# Altium footprint library SensWearComponents.PcbLib: 58 footprints (part 1 of 4)
Each footprint in its own frame and in the unit in brackets; x right, y up, seen from the top. Pads: shape width x height; smd on the part's side, far side on the other; paste and mask are expansions set on the pad; w line width, h text height; cw(c..) or ccw(c..) is an arc to the next point about the centre after c.
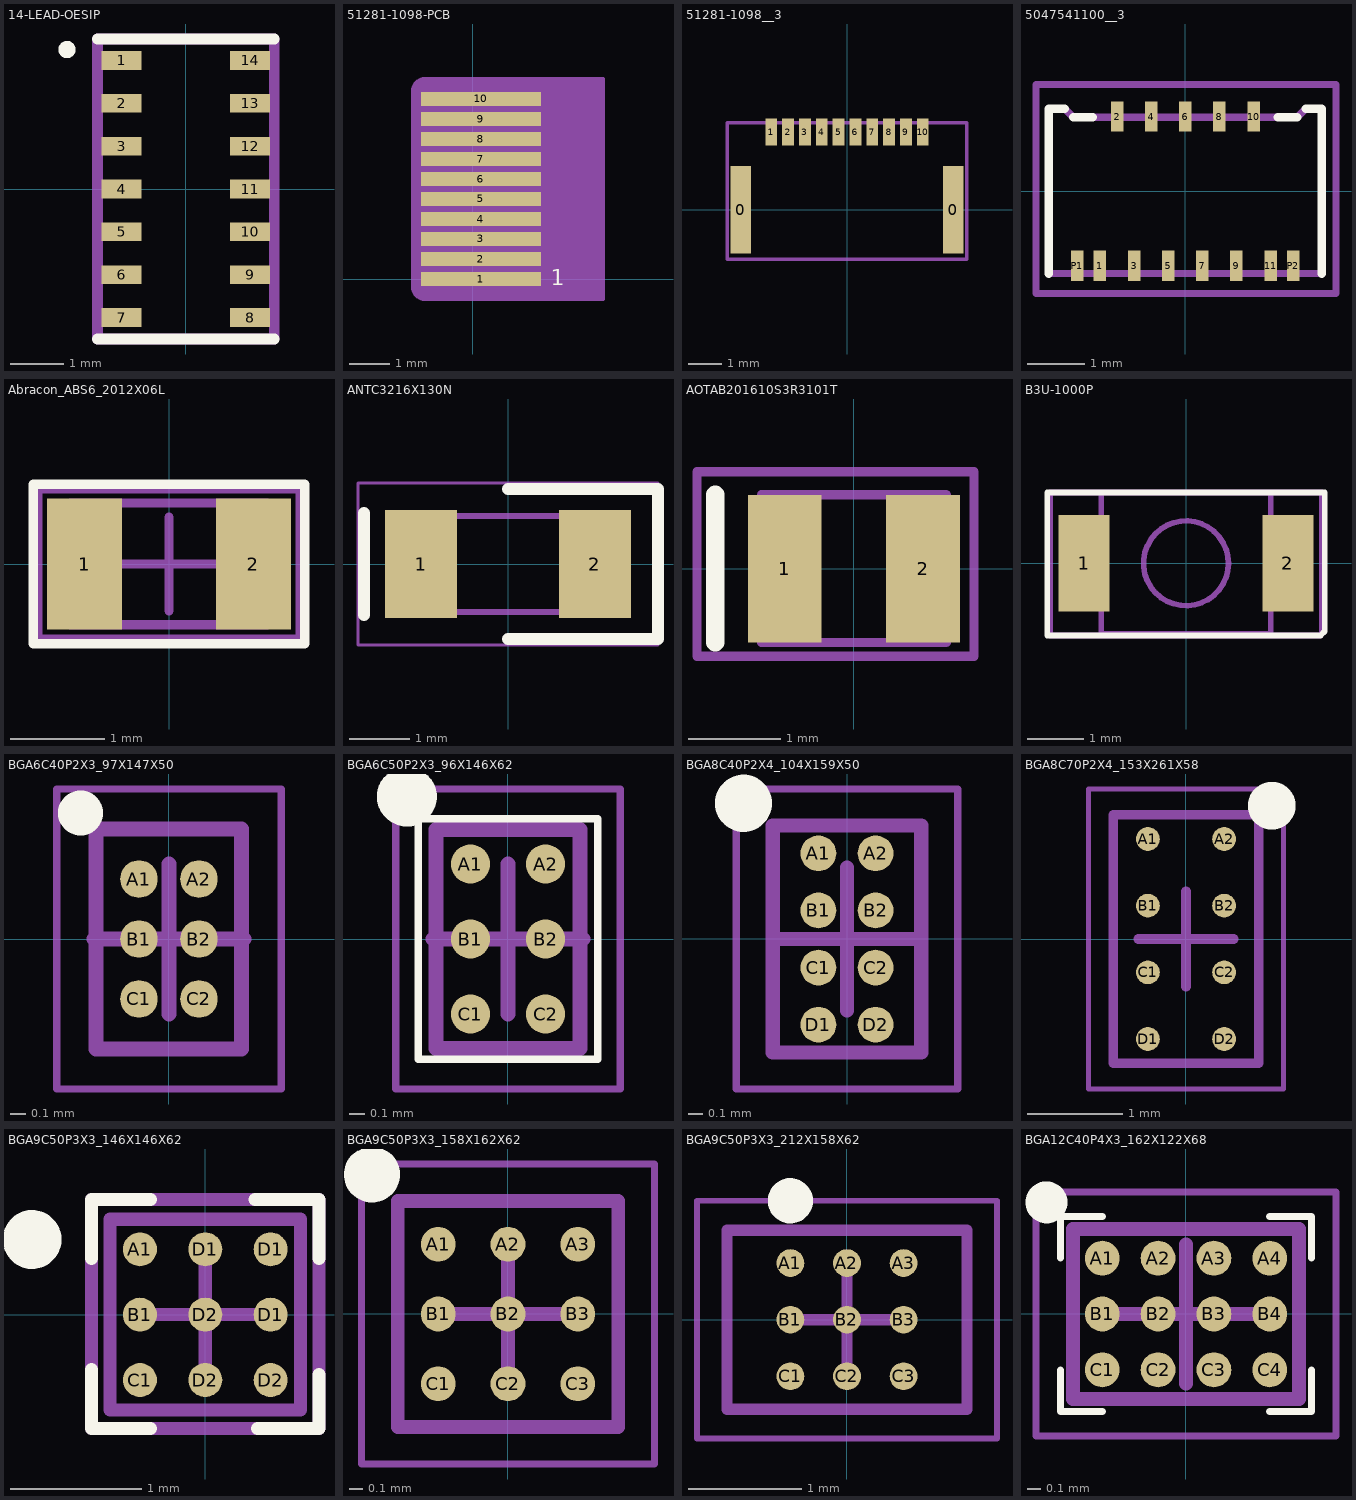
[diagram p0: the footprints below, top view; thin cyan lines are the x and y axes]

## 14-LEAD-OESIP [mm]
pads (14):
  rect 0.75x0.35 smd: 1(-1.2,2.4) 2(-1.2,1.6) 3(-1.2,0.8) 4(-1.2,0) 5(-1.2,-0.8) 6(-1.2,-1.6) 7(-1.2,-2.4) 8(1.2,-2.4) 9(1.2,-1.6) 10(1.2,-0.8) 11(1.2,0) 12(1.2,0.8) 13(1.2,1.6) 14(1.2,2.4)
Top Overlay:
  circle w0.2: c-2.219,2.603 r0.06
  lines w0.2: -1.65,-2.8 1.65,-2.8 ; -1.65,2.8 1.65,2.8
Mechanical 13:
  lines w0.2: -1.65,-2.8 -1.65,2.8 1.65,2.8 1.65,-2.8 -1.65,-2.8
Mechanical 29:
  text ".Designator" at 0.212,-2.198 h1
3D body "MAX30101EFD+T.stp": height 1.33, standoff 0, extent -1.4,-2.8 1.4,2.8

## 51281-1098-PCB [mm]
pads (10):
  rect 3x0.35 smd paste-400 mask+0: 1(0.2,0) 2(0.2,0.5) 3(0.2,1) 4(0.2,1.5) 5(0.2,2) 6(0.2,2.5) 7(0.2,3) 8(0.2,3.5) 9(0.2,4) 10(0.2,4.5)
Top Overlay:
  text "1" at 1.95,-0.15 h0.4
Mechanical 1:
  lines w0.1: 3.25,-0.5 -1.2,-0.5 cw(c-1.2,-0.2) -1.5,-0.2 -1.5,4.7 cw(c-1.2,4.7) -1.2,5 3.25,5
Mechanical 2:
  region: -1.2,-0.5 -1.26,-0.5 -1.37,-0.454 -1.454,-0.37 -1.5,-0.26 -1.5,-0.2 -1.5,4.7 -1.5,4.76 -1.454,4.87 -1.37,4.954 -1.26,5 -1.2,5 3.25,5 3.25,-0.5
  lines w0.1: -1.5,-0.2 ccw(c-1.2,-0.2) -1.2,-0.5 3.25,-0.5 3.25,5 -1.2,5 ccw(c-1.2,4.7) -1.5,4.7 -1.5,-0.2
  text "Stiffner" at -0.75,-1.5 h0.4

## 51281-1098__3 [mm]
pads (12):
  rect 0.6x2.6 smd: 0(-3.15,0) 0(3.15,0)
  rect 0.35x0.8 smd: 1(-2.25,2.3) 2(-1.75,2.3) 3(-1.25,2.3) 4(-0.75,2.3) 5(-0.25,2.3) 6(0.25,2.3) 7(0.75,2.3) 8(1.25,2.3) 9(1.75,2.3) 10(2.25,2.3)
Mechanical 15:
  lines w0.1: -3.55,-1.475 3.55,-1.475 3.55,2.575 -3.55,2.575 -3.55,-1.475
Mechanical 29:
  lines w0.1: -3.55,-1.475 3.55,-1.475 3.55,2.575 -3.55,2.575 -3.55,-1.475
  text ".Designator" at -3.499,-0.233 h0.7
3D body "0512811098.stp": height 1.17, standoff -0.03, extent -3.55,-1.475 3.55,2.575

## 5047541100__3 [mm]
pads (13):
  rect 0.22x0.54 smd: 1(-1.5,-1.31) 3(-0.9,-1.31) 5(-0.3,-1.31) 7(0.3,-1.31) 9(0.9,-1.31) 11(1.5,-1.31) P1(-1.9,-1.31) P2(1.9,-1.31)
  rect 0.22x0.53 smd: 2(-1.2,1.31) 4(-0.6,1.31) 6(0,1.31) 8(0.6,1.31) 10(1.2,1.31)
Top Overlay:
  lines w0.152: -2.4,-1.45 -2.4,1.45 -2.12,1.45 ; -1.97,1.3 -1.627,1.3 ; 1.628,1.3 1.97,1.3 ; 2.12,1.45 2.4,1.45 2.4,-1.45
Mechanical 13:
  lines w0.127: -2.4,-1.45 2.4,-1.45 2.4,1.45 2.12,1.45 1.97,1.3 -1.97,1.3 -2.12,1.45 -2.4,1.45 -2.4,-1.45
Mechanical 15:
  lines w0.127: -2.625,-1.8 -2.625,1.875 2.65,1.875 2.65,-1.8 -2.625,-1.8
Mechanical 29:
  text ".Designator" at -2.2,-0.142 h0.7
3D body "5047541100.stp": height 1.46, standoff -0.02, extent -2.375,-1.525 2.425,1.475

## Abracon_ABS6_2012X06L [mm] "Abracon ABS06 Series, 2-Leads, Body 2.0x1.2mm, IPC High Density"
height 0.6
pads (2):
  rect 0.8x1.4 smd: 1(-0.9,0) 2(0.9,0)
Top Overlay:
  lines w0.1: -1.45,-0.85 -1.45,0.85 1.45,0.85 1.45,-0.85 -1.45,-0.85
Top Assembly:
  lines w0.1: -0.5,0 0.5,0 ; 0,-0.5 0,0.5 ; -1.4,-0.8 1.4,-0.8 1.4,0.8 -1.4,0.8 -1.4,-0.8
Top 3D Body:
  lines w0.1: -1.05,-0.65 -1.05,0.65 1.05,0.65 1.05,-0.65 -1.05,-0.65
Top Courtyard:
  lines w0.1: -1.4,-0.8 1.4,-0.8 1.4,0.8 -1.4,0.8 -1.4,-0.8
  text ".Designator" at -0.375,-0.075 h0.5
3D body: height 0.6, standoff 0, extent -1.05,-0.65 1.05,0.65

## ANTC3216X130N [mm]
pads (2):
  rect 1.2x1.8 smd: 1(-1.45,0) 2(1.45,0)
Top Overlay:
  lines w0.2: -2.4,-0.85 -2.4,0.85 ; 0,-1.25 2.5,-1.25 2.5,1.25 0,1.25
Mechanical 15:
  lines w0.1: -1.6,0.2 -1,0.8 ; -1.6,-0.8 -1.6,0.8 1.6,0.8 1.6,-0.8 -1.6,-0.8
Mechanical 20:
  lines w0.05: -2.5,-1.35 -2.5,1.35 2.5,1.35 2.5,-1.35 -2.5,-1.35
3D body "2450AT18E0100E.stp": height 1.3, standoff 0, extent -1.6,-0.8 1.6,0.8

## AOTAB201610S3R3101T [mm]
pads (2):
  rect 0.8x1.6 smd: 1(-0.75,0) 2(0.75,0)
Top Overlay:
  lines w0.2: -1.5,-0.8 -1.5,0.8
Top Assembly:
  lines w0.1: -1.7,-0.95 1.3,-0.95 1.3,1.05 -1.7,1.05 -1.7,-0.95
Top Courtyard:
  lines w0.1: -1,-0.8 -1,0.8 1,0.8 1,-0.8 -1,-0.8
3D body "AOTA-B201610S3R3-101-T.stp": height 1, standoff 0, extent -1,-0.8 1,0.8

## B3U-1000P [mm]
pads (2):
  rect 0.9x1.7 smd: 1(-1.8,0) 2(1.8,0)
Top Overlay:
  lines w0.1: -2.45,-1.275 2.375,-1.275 2.45,-1.2 2.45,1.25 -2.45,1.25 -2.45,-1.275
Mechanical 15:
  circle w0.1: c0,0 r0.75
  lines w0.1: -1.5,-0.7 -2,-0.7 -2,0.7 -1.5,0.7 ; 1.5,-0.7 2,-0.7 2,0.7 1.5,0.7 ; -1.5,-1.25 1.5,-1.25 1.5,1.25 -1.5,1.25 -1.5,-1.25
Mechanical 29:
  lines w0.1: -2.4,-1.275 -2.4,1.25 2.4,1.25 2.4,-1.25 2.375,-1.275 -2.4,-1.275
  text ".Designator" at -0.05,-0.05 h0.7
3D body: height 1.6, standoff 1.2, extent -0.744,-0.748 0.75,0.749
3D body: height 1.2, standoff 0, extent -1.499,-1.249 1.499,1.249
3D body: height 0.05, standoff 0, extent -1.999,-0.699 -1.501,0.699
3D body: height 0.05, standoff 0, extent 1.501,-0.699 1.999,0.699

## BGA6C40P2X3_97X147X50 [mm] "BGA, 6-Leads, Body 0,97x1,47mmx0,50mm, Pitch 0,40mm"
height 0.5
pads (6):
  round 0.25 smd paste+0 mask+0: A1(-0.2,0.4) A2(0.2,0.4) B1(-0.2,0) B2(0.2,0) C1(-0.2,-0.4) C2(0.2,-0.4)
Top Overlay:
  circle w0.2: c-0.59,0.84 r0.05
Top Assembly:
  lines w0.1: -0.485,-0.735 0.485,-0.735 0.485,0.735 -0.485,0.735 -0.485,-0.735
Top Courtyard:
  lines w0.05: -0.75,-1 0.75,-1 0.75,1 -0.75,1 -0.75,-1
  lines w0.1: -0.5,0 0.5,0 ; 0,-0.5 0,0.5
  text ".Designator" at -0.6,-0.006 h0.5
3D body "BGA6C40P2X3_97X147X50.step": height 0.5, standoff 0, extent -0.485,-0.735 0.485,0.735

## BGA6C50P2X3_96X146X62 [mm] "BGA, 6-Leads, Body 0.96x1.46mmx0.63mm, Pitch 0.50mm"
height 0.63
pads (6):
  round 0.26 smd paste+0 mask+0: A1(-0.25,0.5) A2(0.25,0.5) B1(-0.25,0) B2(0.25,0) C1(-0.25,-0.5) C2(0.25,-0.5)
Top Overlay:
  circle w0.3: c-0.675,0.95 r0.05
  lines w0.05: -0.6,-0.8 0.6,-0.8 0.6,0.8 -0.6,0.8 -0.6,-0.8
Top Assembly:
  lines w0.05: -0.75,-1 -0.75,1 0.75,1 0.75,-1 -0.75,-1
  lines w0.1: -0.5,0 0.5,0 ; 0,-0.5 0,0.5
Top 3D Body:
  lines w0.1: -0.48,-0.73 0.48,-0.73 0.48,0.73 -0.48,0.73 -0.48,-0.73
Top Courtyard:
  lines w0.05: -0.75,-1 -0.75,1 0.75,1 0.75,-1 -0.75,-1
  text ".Designator" at 0,-0.35 h0.4
Dimensions:
  text "*x*" at 0.2,-0.7 h0.5
3D body: height 0.63, standoff 0.23, extent -0.48,-0.73 0.48,0.73

## BGA8C40P2X4_104X159X50 [mm] "BGA, 8-Leads, Body 1,04x1,59mmx0,50mm, Pitch 0,40mm"
height 0.5
pads (8):
  round 0.25 smd paste+0 mask+0: A1(-0.2,0.6) A2(0.2,0.6) B1(-0.2,0.2) B2(0.2,0.2) C1(-0.2,-0.2) C2(0.2,-0.2) D1(-0.2,-0.6) D2(0.2,-0.6)
Top Overlay:
  circle w0.3: c-0.725,0.95 r0.05
Top Assembly:
  lines w0.1: -0.5,0 0.5,0 ; 0,-0.5 0,0.5 ; -0.52,-0.795 -0.52,0.795 0.52,0.795 0.52,-0.795 -0.52,-0.795
Top Courtyard:
  lines w0.05: -0.775,-1.05 -0.775,1.05 0.775,1.05 0.775,-1.05 -0.775,-1.05
  text ".Designator" at -0.921,-0.106 h0.5
3D body "BGA8C40P2X4_104X159X50.step": height 0.5, standoff 0, extent -0.52,-0.795 0.52,0.795

## BGA8C70P2X4_153X261X58 [mm] "BGA, 8-Leads, Body 1.53x2.61mmx0.58mm, Pitch 0.70mm"
height 0.58
pads (8):
  round 0.25 smd mask+0.05: A1(-0.4,1.05) A2(0.4,1.05) B1(-0.4,0.35) B2(0.4,0.35) C1(-0.4,-0.35) C2(0.4,-0.35) D1(-0.4,-1.05) D2(0.4,-1.05)
Top Overlay:
  circle w0.4: c0.9,1.4 r0.05
Top Assembly:
  lines w0.1: -0.5,0 0.5,0 ; 0,-0.5 0,0.5 ; -0.765,-1.305 0.765,-1.305 0.765,1.305 -0.765,1.305 -0.765,-1.305
Top Courtyard:
  lines w0.05: -1.025,-1.575 1.025,-1.575 1.025,1.575 -1.025,1.575 -1.025,-1.575
  text ".Designator" at 0.158,-1.575 h0.7
3D body "BGA8C70P2X4_153X261X58.step": height 0.58, standoff 0, extent -0.765,-1.305 0.765,1.305

## BGA9C50P3X3_146X146X62 [mm] "BGA, 9-Leads, Body 1.46x1.46mmx0.62mm, Pitch 0.50mm"
height 0.62
pads (9):
  round 0.26 smd paste+0 mask+0: A1(-0.5,0.5) B1(-0.5,0) C1(-0.5,-0.5) D1(0,0.5) D1(0.5,0) D1(0.5,0.5) D2(0,-0.5) D2(0,0) D2(0.5,-0.5)
Top Overlay:
  circle w0.25: c-1.325,0.575 r0.1
  lines w0.1: -0.87,-0.42 -0.87,-0.87 -0.42,-0.87 ; -0.87,0.43 -0.87,0.88 -0.42,0.88 ; 0.38,0.88 0.87,0.88 0.87,0.43 ; 0.4,-0.87 0.87,-0.87 0.87,-0.46
Top Assembly:
  lines w0.1: -0.5,0 0.5,0 ; 0,-0.5 0,0.5 ; -0.87,-0.87 -0.87,0.88 0.87,0.88 0.87,-0.87 -0.87,-0.87
Top 3D Body:
  lines w0.1: -0.73,-0.73 -0.73,0.73 0.73,0.73 0.73,-0.73 -0.73,-0.73
Top Courtyard:
  lines w0.1: -0.87,-0.87 0.87,-0.87 0.87,0.88 -0.87,0.88 -0.87,-0.87
  text ".Designator" at -0.6,-0.1 h0.7
3D body "BGA9C50P3X3_146X146X62.step": height 0.62, standoff 0, extent -0.73,-0.73 0.73,0.73

## BGA9C50P3X3_158X162X62 [mm] "BGA, 9-Leads, Body 1,58x1,62mmx0,63mm, Pitch 0,50mm"
height 0.63
pads (9):
  round 0.25 smd paste+0 mask+0: A1(-0.5,0.5) A2(0,0.5) A3(0.5,0.5) B1(-0.5,0) B2(0,0) B3(0.5,0) C1(-0.5,-0.5) C2(0,-0.5) C3(0.5,-0.5)
Top Overlay:
  circle w0.3: c-0.975,1 r0.05
Top Assembly:
  lines w0.1: -0.5,0 0.5,0 ; 0,-0.5 0,0.5 ; -0.79,-0.81 0.79,-0.81 0.79,0.81 -0.79,0.81 -0.79,-0.81
Top Courtyard:
  lines w0.05: -1.05,-1.075 1.05,-1.075 1.05,1.075 -1.05,1.075 -1.05,-1.075
  text ".Designator" at -1.021,-0.113 h0.5
3D body "BGA9C50P3X3_158X162X62.step": height 0.63, standoff 0, extent -0.79,-0.81 0.79,0.81

## BGA9C50P3X3_212X158X62 [mm] "BGA, 9-Leads, Body 2.12x1.58mmx0.63mm, Pitch 0.50mm"
height 0.63
pads (9):
  round 0.245 smd paste+0 mask+0: A1(-0.5,0.5) A2(0,0.5) A3(0.5,0.5) B1(-0.5,0) B2(0,0) B3(0.5,0) C1(-0.5,-0.5) C2(0,-0.5) C3(0.5,-0.5)
Top Overlay:
  circle w0.2: c-0.5,1.05 r0.1
Top Assembly:
  lines w0.05: -1.325,-1.05 -1.325,1.05 1.325,1.05 1.325,-1.05 -1.325,-1.05
Top Courtyard:
  lines w0.05: -1.325,-1.05 -1.325,1.05 1.325,1.05 1.325,-1.05 -1.325,-1.05
  text ".Designator" at -0.725,-0.317 h0.7
Assembly Notes:
  lines w0.1: -1.06,-0.79 -1.06,0.79 1.06,0.79 1.06,-0.79 -1.06,-0.79
V Cut:
  lines w0.1: -0.5,0 0.5,0 ; 0,-0.5 0,0.5
3D body "BGA9C50P3X3_212X158X62.step": height 0.63, standoff 0, extent -1.06,-0.79 1.06,0.79

## BGA12C40P4X3_162X122X68 [mm] "BGA, 12-Leads, Body 1.62x1.22mmx0.68mm, Pitch 0.40mm"
height 0.68
pads (12):
  round 0.25 smd paste+0 mask+0: A1(-0.6,0.4) A2(-0.2,0.4) A3(0.2,0.4) A4(0.6,0.4) B1(-0.6,0) B2(-0.2,0) B3(0.2,0) B4(0.6,0) C1(-0.6,-0.4) C2(-0.2,-0.4) C3(0.2,-0.4) C4(0.6,-0.4)
Top Overlay:
  circle w0.2: c-1,0.8 r0.05
  lines w0.05: -0.9,-0.4 -0.9,-0.7 -0.6,-0.7 ; -0.9,0.4 -0.9,0.7 -0.6,0.7 ; 0.6,-0.7 0.9,-0.7 0.9,-0.4 ; 0.6,0.7 0.9,0.7 0.9,0.4
Top Assembly:
  lines w0.05: -1.075,-0.875 -1.075,0.875 1.075,0.875 1.075,-0.875 -1.075,-0.875
  lines w0.1: -0.5,0 0.5,0 ; 0,-0.5 0,0.5
Top 3D Body:
  lines w0.1: -0.81,-0.61 0.81,-0.61 0.81,0.61 -0.81,0.61 -0.81,-0.61
Top Courtyard:
  lines w0.05: -1.075,-0.875 -1.075,0.875 1.075,0.875 1.075,-0.875 -1.075,-0.875
  text ".Designator" at -0.6,0 h0.5
3D body "BGA12C40P4X3_162X122X68.step": height 0.67, standoff 0, extent -0.81,-0.61 0.81,0.61